# EAGLE library part RASPBERRY-PI-5 (library moto-edge-hil)
RASPBERRY-PI-5 Raspberry Pi 5 - 40-pin GPIO header (HAT standardi), 58x49 M2.5 delik deseni. Kart: 85.0 x 56.0 mm - Guven: H STEP: raspberrypi.com Pi 5 STEP (datasheets.raspberrypi.com)
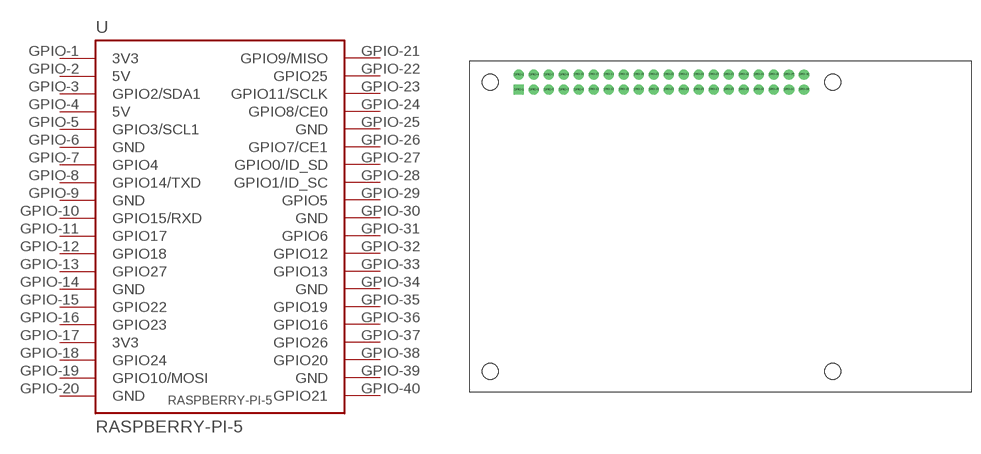
[diagram p0: symbol with the pads of RASPBERRY-PI-5; footprint RASPBERRY-PI-5]

Designator prefix U

## RASPBERRY-PI-5 (BOARD_SIZE: 85.0x56.0mm; CONFIDENCE: H)  [RASPBERRY-PI-5]
GPIO-1  3V3  pas
GPIO-2  5V  pas
GPIO-3  GPIO2/SDA1  pas
GPIO-4  5V  pas
GPIO-5  GPIO3/SCL1  pas
GPIO-6  GND  pas
GPIO-7  GPIO4  pas
GPIO-8  GPIO14/TXD  pas
GPIO-9  GND  pas
GPIO-10  GPIO15/RXD  pas
GPIO-11  GPIO17  pas
GPIO-12  GPIO18  pas
GPIO-13  GPIO27  pas
GPIO-14  GND  pas
GPIO-15  GPIO22  pas
GPIO-16  GPIO23  pas
GPIO-17  3V3  pas
GPIO-18  GPIO24  pas
GPIO-19  GPIO10/MOSI  pas
GPIO-20  GND  pas
GPIO-21  GPIO9/MISO  pas
GPIO-22  GPIO25  pas
GPIO-23  GPIO11/SCLK  pas
GPIO-24  GPIO8/CE0  pas
GPIO-25  GND  pas
GPIO-26  GPIO7/CE1  pas
GPIO-27  GPIO0/ID_SD  pas
GPIO-28  GPIO1/ID_SC  pas
GPIO-29  GPIO5  pas
GPIO-30  GND  pas
GPIO-31  GPIO6  pas
GPIO-32  GPIO12  pas
GPIO-33  GPIO13  pas
GPIO-34  GND  pas
GPIO-35  GPIO19  pas
GPIO-36  GPIO16  pas
GPIO-37  GPIO26  pas
GPIO-38  GPIO20  pas
GPIO-39  GND  pas
GPIO-40  GPIO21  pas

## Footprint RASPBERRY-PI-5 (pad centres in mm)
Raspberry Pi 5 - 40-pin GPIO header (HAT standardi), 58x49 M2.5 delik deseni. | Kart: 85.0 x 56.0 mm | Guven: H
drill 1 pad 1.7 square: GPIO-1 -34.13,23.23
drill 1 pad 1.7 round: GPIO-2 -34.13,25.77; GPIO-3 -31.59,23.23; GPIO-4 -31.59,25.77; GPIO-5 -29.05,23.23; GPIO-6 -29.05,25.77; GPIO-7 -26.51,23.23; GPIO-8 -26.51,25.77; GPIO-9 -23.97,23.23; GPIO-10 -23.97,25.77; GPIO-11 -21.43,23.23; GPIO-12 -21.43,25.77; GPIO-13 -18.89,23.23; GPIO-14 -18.89,25.77; GPIO-15 -16.35,23.23; GPIO-16 -16.35,25.77; GPIO-17 -13.81,23.23; GPIO-18 -13.81,25.77; GPIO-19 -11.27,23.23; GPIO-20 -11.27,25.77; GPIO-21 -8.73,23.23; GPIO-22 -8.73,25.77; GPIO-23 -6.19,23.23; GPIO-24 -6.19,25.77; GPIO-25 -3.65,23.23; GPIO-26 -3.65,25.77; GPIO-27 -1.11,23.23; GPIO-28 -1.11,25.77; GPIO-29 1.43,23.23; GPIO-30 1.43,25.77; GPIO-31 3.97,23.23; GPIO-32 3.97,25.77; GPIO-33 6.51,23.23; GPIO-34 6.51,25.77; GPIO-35 9.05,23.23; GPIO-36 9.05,25.77; GPIO-37 11.59,23.23; GPIO-38 11.59,25.77; GPIO-39 14.13,23.23; GPIO-40 14.13,25.77
hole 2.7 at -39,-24.5
hole 2.7 at 19,-24.5
hole 2.7 at -39,24.5
hole 2.7 at 19,24.5